# Altium footprint library FPGAENTRY.PcbLib: 36 footprints (part 1 of 3)
Each footprint in its own frame and in the unit in brackets; x right, y up, seen from the top. Pads: shape width x height; smd on the part's side, far side on the other; paste and mask are expansions set on the pad; w line width, h text height; cw(c..) or ccw(c..) is an arc to the next point about the centre after c.
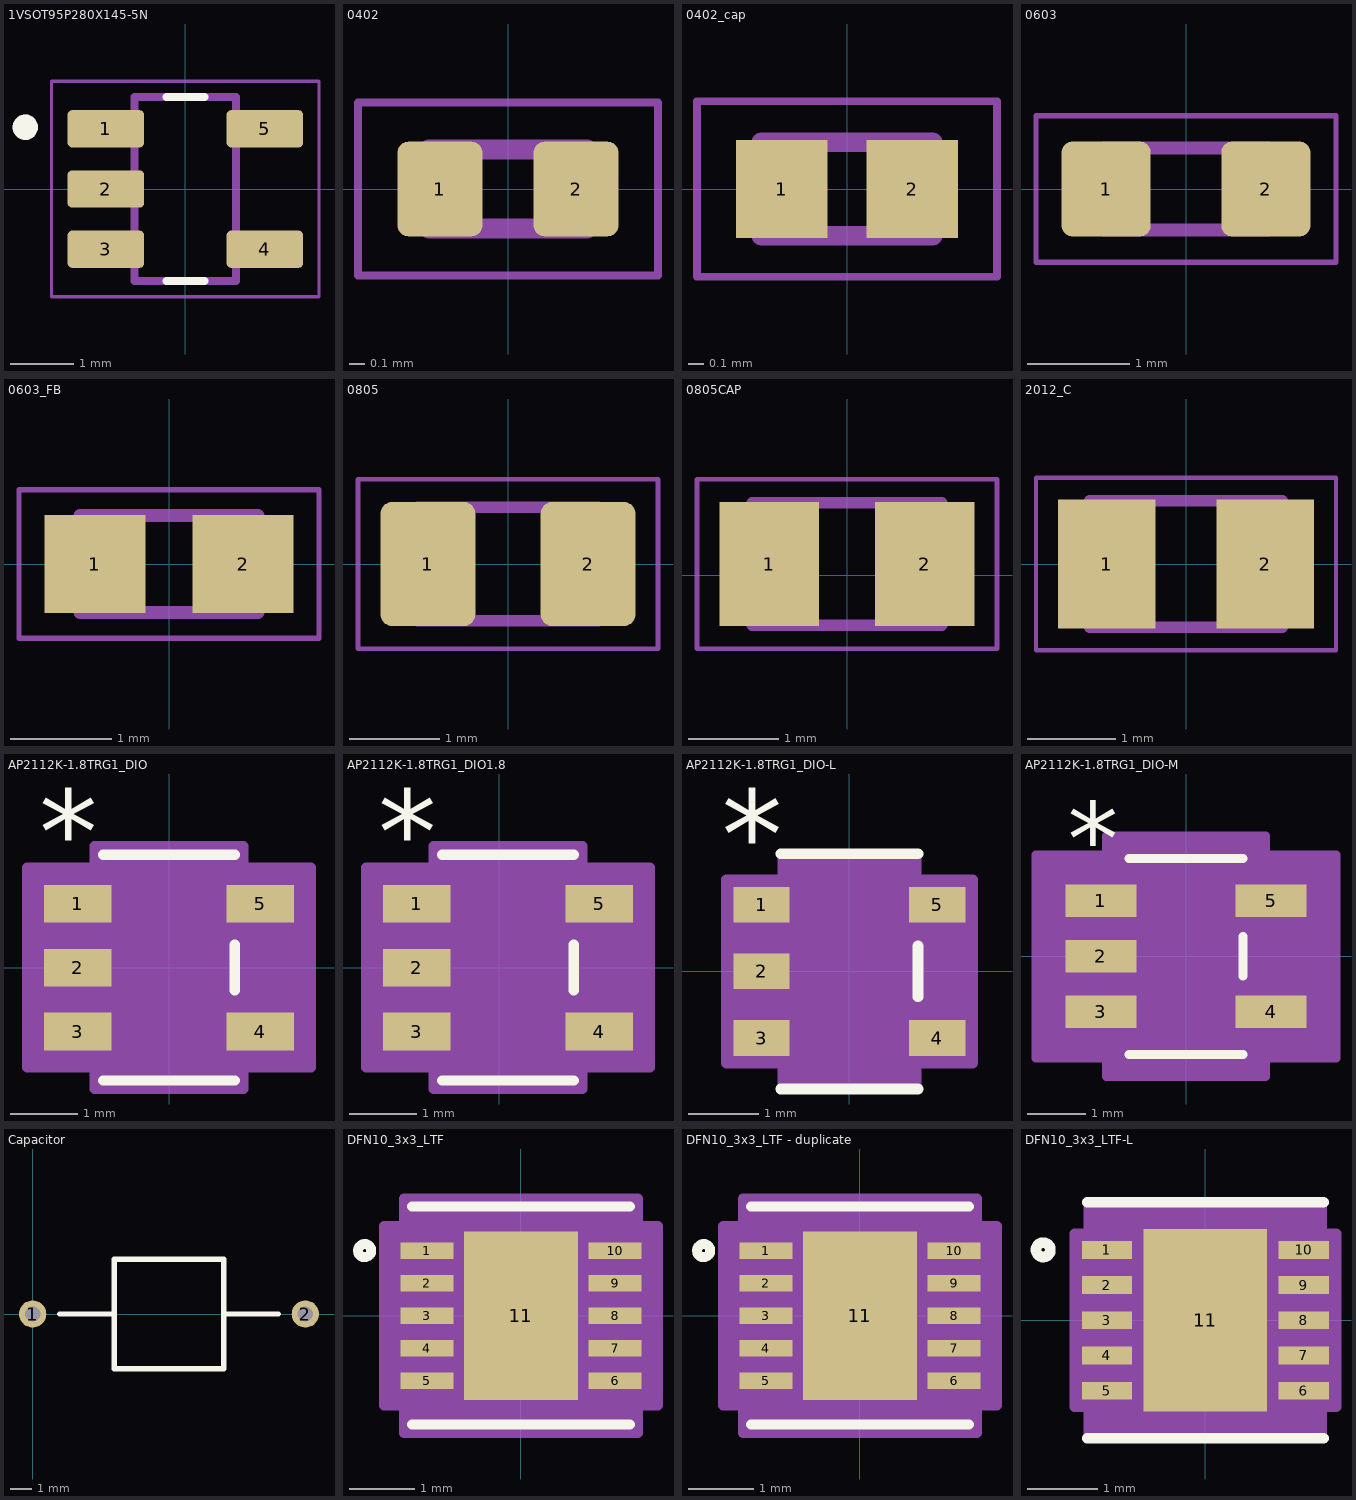
[diagram p0: the footprints below, top view; thin cyan lines are the x and y axes]

## 1VSOT95P280X145-5N [mm]
pads (5):
  rrect25% 1.21x0.59 smd: 1(-1.255,0.95) 2(-1.255,0) 3(-1.255,-0.95) 4(1.255,-0.95) 5(1.255,0.95)
Top Overlay:
  circle w0.2: c-2.525,0.975 r0.1
  lines w0.127: -0.3,-1.45 0.3,-1.45 ; -0.3,1.45 0.3,1.45
Mechanical 13:
  circle w0.2: c-2.525,0.975 r0.1
  lines w0.127: -0.8,-1.45 -0.8,1.45 0.8,1.45 0.8,-1.45 -0.8,-1.45
Mechanical 15:
  lines w0.05: -2.11,-1.7 2.11,-1.7 2.11,1.7 -2.11,1.7 -2.11,-1.7
3D body "step_temp.STEP": height 1.45, standoff 0, extent -1.4,-1.45 1.4,1.45

## 0402 [mm]
pads (2):
  rrect25% 0.54x0.6 smd paste+0 mask+0.102: 1(-0.432,0) 2(0.432,0)
Mechanical 13:
  lines w0.127: -0.5,-0.25 0.5,-0.25 0.5,0.25 -0.5,0.25 -0.5,-0.25
Mechanical 15:
  lines w0.05: -0.952,-0.55 0.952,-0.55 0.952,0.55 -0.952,0.55 -0.952,-0.55
3D body "step_temp.STEP": height 0.55, standoff 0, extent -0.5,-0.25 0.5,0.25

## 0402_cap [mm]
pads (2):
  rect 0.59x0.63 smd: 1(-0.42,0) 2(0.42,0)
Mechanical 13:
  lines w0.127: -0.55,-0.3 0.55,-0.3 0.55,0.3 -0.55,0.3 -0.55,-0.3
Mechanical 15:
  lines w0.05: -0.965,-0.565 0.965,-0.565 0.965,0.565 -0.965,0.565 -0.965,-0.565
3D body "step_temp.STEP": height 0.56, standoff 0, extent -0.5,-0.25 0.5,0.25

## 0603 [mm]
pads (2):
  rrect25% 0.87x0.93 smd paste+0 mask+0.102: 1(-0.78,0) 2(0.78,0)
Mechanical 13:
  lines w0.127: -0.8,-0.4 -0.8,0.4 0.8,0.4 0.8,-0.4 -0.8,-0.4
Mechanical 15:
  lines w0.05: -1.465,-0.715 -1.465,0.715 1.465,0.715 1.465,-0.715 -1.465,-0.715

## 0603_FB [mm]
pads (2):
  rect 1x0.97 smd: 1(-0.735,0) 2(0.735,0)
Mechanical 13:
  lines w0.127: -0.88,-0.48 0.88,-0.48 0.88,0.48 -0.88,0.48 -0.88,-0.48
Mechanical 15:
  lines w0.05: -1.485,-0.735 1.485,-0.735 1.485,0.735 -1.485,0.735 -1.485,-0.735

## 0805 [mm]
pads (2):
  rrect25% 1.05x1.38 smd: 1(-0.888,0) 2(0.888,0)
Mechanical 13:
  lines w0.127: -1,-0.63 -1,0.63 1,0.63 1,-0.63 -1,-0.63
Mechanical 15:
  lines w0.05: -1.663,-0.94 -1.663,0.94 1.663,0.94 1.663,-0.94 -1.663,-0.94
3D body "step_temp.STEP": height 0.95, standoff 0, extent -1,-0.625 1,0.625

## 0805CAP [mm]
pads (2):
  rect 1.1x1.38 smd: 1(-0.863,0.127) 2(0.863,0.127)
Mechanical 13:
  lines w0.127: -1.05,-0.553 1.05,-0.553 1.05,0.807 -1.05,0.807 -1.05,-0.553
Mechanical 15:
  lines w0.05: -1.665,-0.813 1.665,-0.813 1.665,1.067 -1.665,1.067 -1.665,-0.813
3D body "step_temp.STEP": height 1.45, standoff 0, extent -1,-0.498 1,0.752

## 2012_C [mm]
pads (2):
  rect 1.11x1.47 smd: 1(-0.9,0) 2(0.9,0)
Mechanical 13:
  lines w0.127: -1.1,-0.72 1.1,-0.72 1.1,0.72 -1.1,0.72 -1.1,-0.72
Mechanical 15:
  lines w0.05: -1.708,-0.983 1.708,-0.983 1.708,0.983 -1.708,0.983 -1.708,-0.983
3D body "step_temp.STEP": height 1.45, standoff 0, extent -1,-0.625 1,0.625

## AP2112K-1.8TRG1_DIO [mil]
pads (5):
  rect 39.56x22 smd paste+0 mask+0: 1(-53.28,37.4) 2(-53.28,0) 3(-53.28,-37.4) 4(53.28,-37.4) 5(53.28,37.4)
Top Overlay:
  lines w6: -38.5,-66 38.5,-66 ; -38.5,66 38.5,66 ; 38.5,-13.3 38.5,13.3
  text ".Designator" at -137.5,-25 h50
  text "*" at -75.78,54.4 h50
Mechanical 13:
  lines w1: -12,61 ccw(c0,61) 12,61 ; -59.06,-47.4 -59.06,-27.4 -33.5,-27.4 -33.5,-47.4 -59.06,-47.4 ; -59.06,-10 -59.06,10 -33.5,10 -33.5,-10 -59.06,-10 ; -59.06,27.4 -59.06,47.4 -33.5,47.4 -33.5,27.4 -59.06,27.4 ; -33.5,-61 33.5,-61 33.5,61 -33.5,61 -33.5,-61 ; 33.5,-47.4 33.5,-27.4 59.06,-27.4 59.06,-47.4 33.5,-47.4 ; 33.5,27.4 33.5,47.4 59.06,47.4 59.06,27.4 33.5,27.4
  text "*" at -31,8 h50
  text ".Designator" at -137.5,-25 h50
Mechanical 15:
  region: -43.5,-58.4 -83.06,-58.4 -83.06,58.4 -43.5,58.4 -43.5,71 43.5,71 43.5,58.4 83.06,58.4 83.06,-58.4 43.5,-58.4 43.5,-71 -43.5,-71
  lines w6: -83.06,-58.4 -83.06,58.4 -43.5,58.4 -43.5,71 43.5,71 43.5,58.4 83.06,58.4 83.06,-58.4 43.5,-58.4 43.5,-71 -43.5,-71 -43.5,-58.4 -83.06,-58.4
3D body "AP2112K-18TRG1_DIO.step": height 45.12, standoff 0, extent -59.06,-60.98 59.06,60.98

## AP2112K-1.8TRG1_DIO1.8 [mil]
pads (5):
  rect 39.56x22 smd paste+0 mask+0: 1(-48.28,37.4) 2(-48.28,0) 3(-48.28,-37.4) 4(58.28,-37.4) 5(58.28,37.4)
Top Overlay:
  lines w6: -33.5,-66 43.5,-66 ; -33.5,66 43.5,66 ; 43.5,-13.3 43.5,13.3
  text "*" at -70.78,54.4 h50
  text ".Designator" at -132.5,-25 h50
Mechanical 13:
  lines w1: -7,61 ccw(c5,61) 17,61 ; -54.06,-47.4 -28.5,-47.4 -28.5,-27.4 -54.06,-27.4 -54.06,-47.4 ; -54.06,-10 -28.5,-10 -28.5,10 -54.06,10 -54.06,-10 ; -54.06,27.4 -28.5,27.4 -28.5,47.4 -54.06,47.4 -54.06,27.4 ; -28.5,-61 -28.5,61 38.5,61 38.5,-61 -28.5,-61 ; 38.5,-47.4 64.06,-47.4 64.06,-27.4 38.5,-27.4 38.5,-47.4 ; 38.5,27.4 64.06,27.4 64.06,47.4 38.5,47.4 38.5,27.4
  text ".Designator" at -132.5,-25 h50
  text "*" at -26,8 h50
Mechanical 15:
  region: -38.5,-58.4 -78.06,-58.4 -78.06,58.4 -38.5,58.4 -38.5,71 48.5,71 48.5,58.4 88.06,58.4 88.06,-58.4 48.5,-58.4 48.5,-71 -38.5,-71
  lines w6: -78.06,-58.4 -38.5,-58.4 -38.5,-71 48.5,-71 48.5,-58.4 88.06,-58.4 88.06,58.4 48.5,58.4 48.5,71 -38.5,71 -38.5,58.4 -78.06,58.4 -78.06,-58.4
3D body "AP2112K-18TRG1_DIO.step": height 45.12, standoff 0, extent -54.06,-60.98 64.06,60.98

## AP2112K-1.8TRG1_DIO-L [mil]
pads (5):
  rect 31.56x20 smd paste+0 mask+0: 1(-49.28,37.4) 2(-49.28,0) 3(-49.28,-37.4) 4(49.28,-37.4) 5(49.28,37.4)
Top Overlay:
  lines w6: -38.5,-66 38.5,-66 ; -38.5,66 38.5,66 ; 38.5,-14.3 38.5,14.3
  text "*" at -71.78,52.4 h50
  text ".Designator" at -137.5,-25 h50
Mechanical 13:
  lines w1: -12,61 ccw(c0,61) 12,61 ; -59.06,-47.4 -33.5,-47.4 -33.5,-27.4 -59.06,-27.4 -59.06,-47.4 ; -59.06,-10 -33.5,-10 -33.5,10 -59.06,10 -59.06,-10 ; -59.06,27.4 -33.5,27.4 -33.5,47.4 -59.06,47.4 -59.06,27.4 ; -33.5,-61 -33.5,61 33.5,61 33.5,-61 -33.5,-61 ; 33.5,-47.4 59.06,-47.4 59.06,-27.4 33.5,-27.4 33.5,-47.4 ; 33.5,27.4 59.06,27.4 59.06,47.4 33.5,47.4 33.5,27.4
  text ".Designator" at -137.5,-25 h50
  text "*" at -31,8 h50
Mechanical 15:
  region: -37.5,-51.4 -69.06,-51.4 -69.06,51.4 -37.5,51.4 -37.5,65 37.5,65 37.5,51.4 69.06,51.4 69.06,-51.4 37.5,-51.4 37.5,-65 -37.5,-65
  lines w6: -69.06,-51.4 -37.5,-51.4 -37.5,-65 37.5,-65 37.5,-51.4 69.06,-51.4 69.06,51.4 37.5,51.4 37.5,65 -37.5,65 -37.5,51.4 -69.06,51.4 -69.06,-51.4
3D body: height 10, standoff 0, extent 0,0 10,10

## AP2112K-1.8TRG1_DIO-M [mil]
pads (5):
  rect 47.56x22 smd paste+0 mask+0: 1(-57.28,37.4) 2(-57.28,0) 3(-57.28,-37.4) 4(57.28,-37.4) 5(57.28,37.4)
Top Overlay:
  lines w6: -38.5,-66 38.5,-66 ; -38.5,66 38.5,66 ; 38.5,-13.3 38.5,13.3
  text ".Designator" at -137.5,-25 h50
  text "*" at -79.78,54.4 h50
Mechanical 13:
  lines w1: -12,61 ccw(c0,61) 12,61 ; -59.06,-47.4 -59.06,-27.4 -33.5,-27.4 -33.5,-47.4 -59.06,-47.4 ; -59.06,-10 -59.06,10 -33.5,10 -33.5,-10 -59.06,-10 ; -59.06,27.4 -59.06,47.4 -33.5,47.4 -33.5,27.4 -59.06,27.4 ; -33.5,-61 33.5,-61 33.5,61 -33.5,61 -33.5,-61 ; 33.5,-47.4 33.5,-27.4 59.06,-27.4 59.06,-47.4 33.5,-47.4 ; 33.5,27.4 33.5,47.4 59.06,47.4 59.06,27.4 33.5,27.4
  text "*" at -31,8 h50
  text ".Designator" at -137.5,-25 h50
Mechanical 15:
  region: -53.5,-68.4 -101.06,-68.4 -101.06,68.4 -53.5,68.4 -53.5,81 53.5,81 53.5,68.4 101.06,68.4 101.06,-68.4 53.5,-68.4 53.5,-81 -53.5,-81
  lines w6: -101.06,-68.4 -101.06,68.4 -53.5,68.4 -53.5,81 53.5,81 53.5,68.4 101.06,68.4 101.06,-68.4 53.5,-68.4 53.5,-81 -53.5,-81 -53.5,-68.4 -101.06,-68.4
3D body: height 10, standoff 0, extent 0,0 10,10

## Capacitor [mil]
pads (2):
  round 50 hole 28: 1(0,0) 2(500,0)
Top Overlay:
  lines w10: 50,0 150,0 ; 350,0 450,0 ; 150,0 150,-100 350,-100 350,100 150,100 150,0

## DFN10_3x3_LTF [mil]
pads (11):
  rect 32x10 smd paste+0 mask+0: 1(-57,39.37) 2(-57,19.68) 3(-57,0) 4(-57,-19.68) 5(-57,-39.37) 6(57,-39.37) 7(57,-19.68) 8(57,0) 9(57,19.68) 10(57,39.37)
  rect 69x102 smd paste+0 mask+0: 11(0,0)
Top Overlay:
  circle w6: c-94.69,39.37 r4
  lines w6: -66,-66 66,-66 ; -66,66 66,66
  text ".Designator" at -137.5,-25 h50
Top Paste:
  region: 30.56,-3.94 -30.56,-3.94 -30.56,-47.06 30.56,-47.06
  region: 30.56,47.06 -30.56,47.06 -30.56,3.94 30.56,3.94
Mechanical 13:
  circle w1: c-41,39.37 r3
  lines w1: -12,61 ccw(c0,61) 12,61 ; -61,-61 -61,61 61,61 61,-61 -61,-61
  text ".Designator" at -137.5,-25 h50
Mechanical 15:
  region: -71,-54.37 -83,-54.37 -83,54.37 -71,54.37 -71,71 71,71 71,54.37 83,54.37 83,-54.37 71,-54.37 71,-71 -71,-71
  lines w6: -83,-54.37 -71,-54.37 -71,-71 71,-71 71,-54.37 83,-54.37 83,54.37 71,54.37 71,71 -71,71 -71,54.37 -83,54.37 -83,-54.37
3D body "DFN10_3x3_LTF.step": height 31.1, standoff 0, extent -60.98,-60.98 60.98,60.98

## DFN10_3x3_LTF - duplicate [mil]
pads (11):
  rect 32x10 smd paste+0 mask+0: 1(-57,39.37) 2(-57,19.68) 3(-57,0) 4(-57,-19.68) 5(-57,-39.37) 6(57,-39.37) 7(57,-19.68) 8(57,0) 9(57,19.68) 10(57,39.37)
  rect 69x102 smd paste+0 mask+0: 11(0,0)
Top Overlay:
  circle w6: c-94.69,39.37 r4
  lines w6: -66,-66 66,-66 ; -66,66 66,66
  text ".Designator" at -137.5,-25 h50
Top Paste:
  region: 30.56,-3.94 -30.56,-3.94 -30.56,-47.06 30.56,-47.06
  region: 30.56,47.06 -30.56,47.06 -30.56,3.94 30.56,3.94
Mechanical 13:
  circle w1: c-41,39.37 r3
  lines w1: -12,61 ccw(c0,61) 12,61 ; -61,-61 -61,61 61,61 61,-61 -61,-61
  text ".Designator" at -137.5,-25 h50
Mechanical 15:
  region: -71,-54.37 -83,-54.37 -83,54.37 -71,54.37 -71,71 71,71 71,54.37 83,54.37 83,-54.37 71,-54.37 71,-71 -71,-71
  lines w6: -83,-54.37 -71,-54.37 -71,-71 71,-71 71,-54.37 83,-54.37 83,54.37 71,54.37 71,71 -71,71 -71,54.37 -83,54.37 -83,-54.37
3D body "DFN10_3x3_LTF.step": height 31.1, standoff 0, extent -60.98,-60.98 60.98,60.98

## DFN10_3x3_LTF-L [mil]
pads (11):
  rect 28x10 smd paste+0 mask+0: 1(-55,39.37) 2(-55,19.68) 3(-55,0) 4(-55,-19.68) 5(-55,-39.37) 6(55,-39.37) 7(55,-19.68) 8(55,0) 9(55,19.68) 10(55,39.37)
  rect 69x102 smd paste+0 mask+0: 11(0,0)
Top Overlay:
  circle w6: c-90.69,39.37 r4
  lines w6: -66,-66 66,-66 ; -66,66 66,66
  text ".Designator" at -137.5,-25 h50
Top Paste:
  region: 30.56,47.06 -30.56,47.06 -30.56,3.94 30.56,3.94
  region: 30.56,-3.94 -30.56,-3.94 -30.56,-47.06 30.56,-47.06
Mechanical 13:
  circle w1: c-41,39.37 r3
  lines w1: -12,61 ccw(c0,61) 12,61 ; -61,-61 61,-61 61,61 -61,61 -61,-61
  text ".Designator" at -137.5,-25 h50
Mechanical 15:
  region: -65,-48.37 -73,-48.37 -73,48.37 -65,48.37 -65,65 65,65 65,48.37 73,48.37 73,-48.37 65,-48.37 65,-65 -65,-65
  lines w6: -73,-48.37 -73,48.37 -65,48.37 -65,65 65,65 65,48.37 73,48.37 73,-48.37 65,-48.37 65,-65 -65,-65 -65,-48.37 -73,-48.37
3D body "DFN10_3x3_LTF.step": height 31.1, standoff 0, extent -60.98,-60.98 60.98,60.98